# Altium footprint library MP1605GTF-Z.PcbLib: 3 footprints
Each footprint in its own frame and in the unit in brackets; x right, y up, seen from the top. Pads: shape width x height; smd on the part's side, far side on the other; paste and mask are expansions set on the pad; w line width, h text height; cw(c..) or ccw(c..) is an arc to the next point about the centre after c.
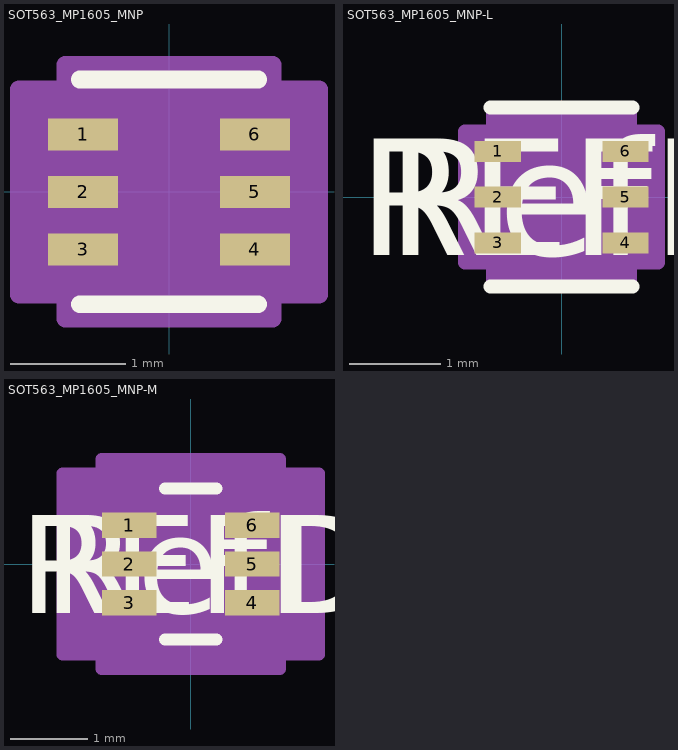
[diagram p0: the footprints below, top view; thin cyan lines are the x and y axes]

## SOT563_MP1605_MNP [mil]
pads (6):
  rect 23.87x11 smd paste+0 mask+0: 1(-29.44,19.68) 2(-29.44,0) 3(-29.44,-19.68) 4(29.44,-19.68) 5(29.44,0) 6(29.44,19.68)
Top Overlay:
  lines w6: -30.5,-38.5 30.5,-38.5 ; -30.5,38.5 30.5,38.5
Mechanical 13:
  circle w0: c-17.5,19.68 r3
  lines w0: -12,33.5 ccw(c0,33.5) 12,33.5
  lines w1: -25.5,-33.5 -25.5,33.5 25.5,33.5 25.5,-33.5 -25.5,-33.5
Mechanical 15:
  region: 35.5,-43.5 -35.5,-43.5 -35.5,-35.19 -51.37,-35.19 -51.37,35.19 -35.5,35.19 -35.5,43.5 35.5,43.5 35.5,35.19 51.37,35.19 51.37,-35.19 35.5,-35.19
  lines w6: -51.37,-35.19 -51.37,35.19 -35.5,35.19 -35.5,43.5 35.5,43.5 35.5,35.19 51.37,35.19 51.37,-35.19 35.5,-35.19 35.5,-43.5 -35.5,-43.5 -35.5,-35.19 -51.37,-35.19
3D body "SOT563_MP1605_MNP.step": height 22.09, standoff 0, extent -33.5,-33.5 33.5,33.5

## SOT563_MP1605_MNP-L [mm]
pads (6):
  rect 0.506x0.229 smd paste+0 mask+0: 1(-0.698,0.5) 2(-0.698,0) 3(-0.698,-0.5) 4(0.698,-0.5) 5(0.698,0) 6(0.698,0.5)
Top Overlay:
  lines w0.152: -0.775,-0.978 0.775,-0.978 ; -0.775,0.978 0.775,0.978
  text "RefDes" at -1.905,-0.635 h1.27
  text "REFDES" at -2.222,-0.635 h1.27
Mechanical 13:
  circle w0: c-0.445,0.5 r0.076
  lines w0: -0.305,0.851 ccw(c0,0.851) 0.305,0.851
  lines w0.025: -0.648,-0.851 0.648,-0.851 0.648,0.851 -0.648,0.851 -0.648,-0.851
  text "RefDes2" at -2.222,-0.635 h1.27
Mechanical 15:
  region: 0.749,-0.953 -0.749,-0.953 -0.749,-0.716 -1.052,-0.716 -1.052,0.716 -0.749,0.716 -0.749,0.953 0.749,0.953 0.749,0.716 1.052,0.716 1.052,-0.716 0.749,-0.716
  lines w0.152: -1.052,-0.716 -0.749,-0.716 -0.749,-0.953 0.749,-0.953 0.749,-0.716 1.052,-0.716 1.052,0.716 0.749,0.716 0.749,0.953 -0.749,0.953 -0.749,0.716 -1.052,0.716 -1.052,-0.716
3D body "SOT563_MP1605_MNP.step": height 0.56, standoff 0, extent -0.851,-0.851 0.851,0.851

## SOT563_MP1605_MNP-M [mm]
pads (6):
  rect 0.706x0.329 smd paste+0 mask+0: 1(-0.798,0.5) 2(-0.798,0) 3(-0.798,-0.5) 4(0.798,-0.5) 5(0.798,0) 6(0.798,0.5)
Top Overlay:
  lines w0.152: -0.332,-0.978 0.332,-0.978 ; -0.332,0.978 0.332,0.978
  text "RefDes" at -1.905,-0.635 h1.27
  text "REFDES" at -2.222,-0.635 h1.27
Mechanical 13:
  circle w0: c-0.445,0.5 r0.076
  lines w0: -0.305,0.851 ccw(c0,0.851) 0.305,0.851
  lines w0.025: -0.648,-0.851 0.648,-0.851 0.648,0.851 -0.648,0.851 -0.648,-0.851
  text "RefDes2" at -2.222,-0.635 h1.27
Mechanical 15:
  region: 1.156,-1.359 -1.156,-1.359 -1.156,-1.173 -1.659,-1.173 -1.659,1.173 -1.156,1.173 -1.156,1.359 1.156,1.359 1.156,1.173 1.659,1.173 1.659,-1.173 1.156,-1.173
  lines w0.152: -1.659,-1.173 -1.156,-1.173 -1.156,-1.359 1.156,-1.359 1.156,-1.173 1.659,-1.173 1.659,1.173 1.156,1.173 1.156,1.359 -1.156,1.359 -1.156,1.173 -1.659,1.173 -1.659,-1.173
3D body "SOT563_MP1605_MNP.step": height 0.56, standoff 0, extent -0.851,-0.851 0.851,0.851